# Altium footprint library KBPC.PcbLib: 1 footprints
Each footprint in its own frame and in the unit in brackets; x right, y up, seen from the top. Pads: shape width x height; smd on the part's side, far side on the other; paste and mask are expansions set on the pad; w line width, h text height; cw(c..) or ccw(c..) is an arc to the next point about the centre after c.
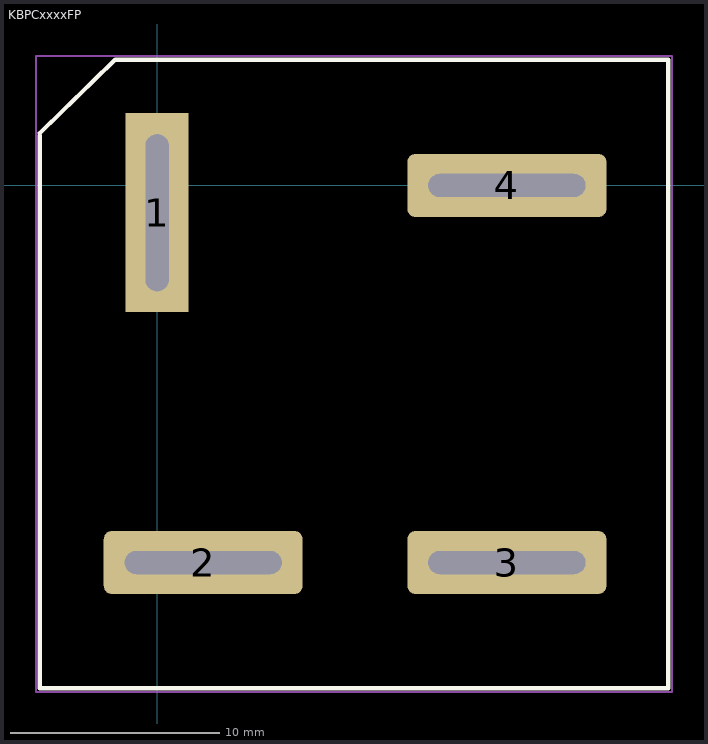
[diagram p0: the footprint, top view; thin cyan lines are the x and y axes]

## KBPCxxxxFP [mm]
pads (4):
  rect 3x9.5 hole 7.5 slot 1.1 at 0 deg: 1(0,-1.3)
  rrect25% 9.5x3 hole 1.1 slot 7.5 at 0 deg: 2(2.2,-18) 3(16.7,-18)
  rrect24% 9.5x3 hole 1.1 slot 7.5 at 0 deg: 4(16.7,0)
Top Overlay:
  lines w0.2: -5.6,2.4 -5.6,-24 24.4,-24 24.4,6 -2,6 -5.6,2.5
  text ".DESIGNATOR" at -5.682,6.358 h1
Mechanical 15:
  lines w0.1: -5.79,-24.19 24.59,-24.19 24.59,6.19 -5.79,6.19 -5.79,-24.19
3D body "p12.2_KBPC.stp": height 7.79, standoff -11.86, extent -4.88,-23.281 23.72,5.319